# Altium schematic symbol library HSR_BM28B06.SchLib: 8 symbols
Pins are listed as number, name and electrical type; pins without a type are passive.

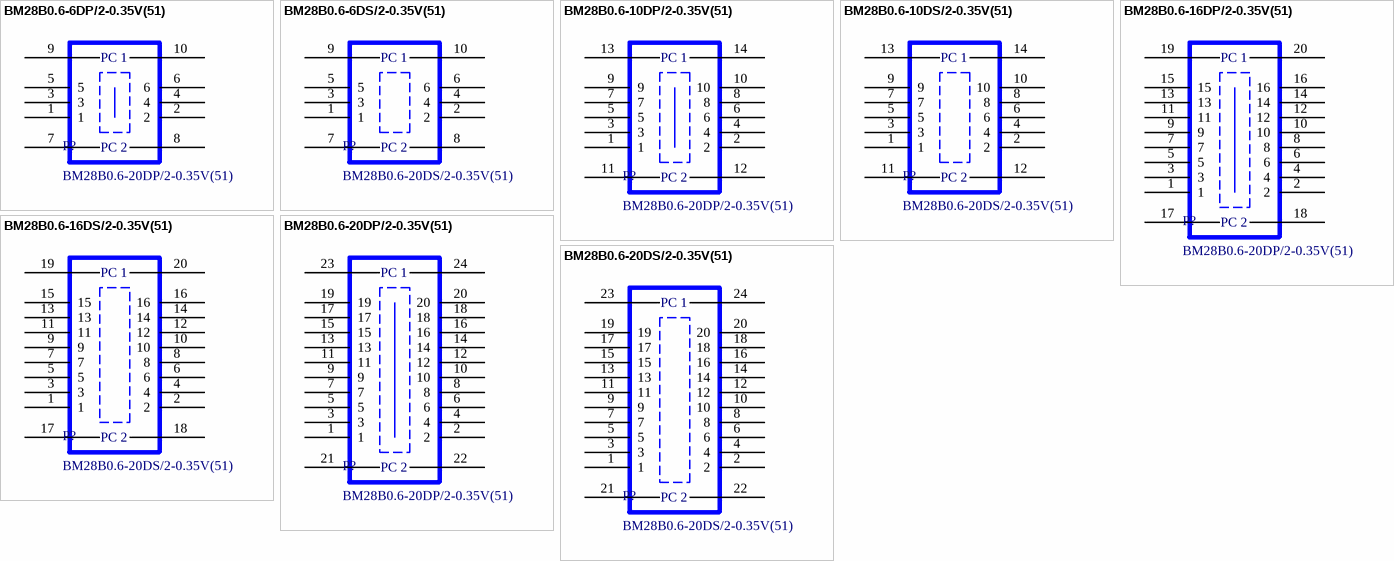
[diagram p0: symbols BM28B0.6-6DP/2-0.35V(51) to BM28B0.6-20DS/2-0.35V(51)]

## BM28B0.6-6DP/2-0.35V(51)
designator P?, comment BM28B0.6-20DP/2-0.35V(51)
Board to Board & Mezzanine Connectors 20P Receptacle Straight SMT; Manufacturer Part Number: BM28B0.6-6DP/2-0.35V(51); Manufacturer: HRS; Value: BM28B0.6-6DP/2-0.35V(51); Voltage Rating DC: 30 V; Current Rating: 5 A; Number of Positions: 8 Position; Pitch: 0.35 mm; Stack Height: 0.6 mm; ComponentLink1Description: Datasheet; ComponentLink1URL: https://www.lcsc.com/datasheet/C424566.pdf?spm=wm.sxq.inf.ggs___wm.fly.bg.3.xh&lcsc_vid=EgBcAV1UFlAKBQdXRlNcUAEEFFIIXl0ARllXUAFfEQQxVlNfQ1hXUlNXQFlcXjsOAxUeFF5JWBYZEEoKFBINSQcJGk4%3D; LCSC Part #: C3648001; Mount: SMD/SMT; Operating Temperature Max: + 85 C; Operating Temperature Min: - 40 C; Packaging: Tape and Reel; Supplier 1 Part Number: 798-28066DP2035V51; Supplier 1 URL: https://www.mouser.vn/en/ProductDetail/Hirose-Connector/BM28B0.6-6DP-2-0.35V51?qs=T3oQrply3y%2FM1wQ2gqV8bg%3D%3D; Supplier 1: Mouser; Supplier 2 Part Number: 26-BM28B0.6-6DP/2-0.35V(51)TR-ND; Supplier 2 URL: https://www.digikey.com/en/products/detail/hirose-electric-co-ltd/BM28B0-6-6DP-2-0-35V-51/11204850?s=N4IgTCBcDaIEIFkwA44AYB0A2AtFgIgAoD0YOmAzAKwBqAFFQIwCUIAugL5A; Supplier 2: Digi-Key; Supplier 3 Part Number: N/A; Supplier 3 URL: N/A; Supplier 3: thegioiic; Mounting Angle: Straight; Number of Rows: 2 Row; Product: Headers
footprint BM28B0.6-6DP/2-0.35V(51)
pins: 1, 2, 3, 4, 5, 6, 7, 8 22, 9, 10 P
text: PC 1; PC 2

## BM28B0.6-6DS/2-0.35V(51)
designator P?, comment BM28B0.6-20DS/2-0.35V(51)
Board to Board & Mezzanine Connectors 20P Receptacle Straight SMT; Manufacturer Part Number: BM28B0.6-6DS/2-0.35V(51); Manufacturer: HRS; Value: BM28B0.6-6DS/2-0.35V(51); Voltage Rating DC: 30 V; Current Rating: 5 A; Number of Positions: 8 Position; Pitch: 0.35 mm; Stack Height: 0.6 mm; ComponentLink1Description: Datasheet; ComponentLink1URL: https://www.lcsc.com/datasheet/C424567.pdf?spm=wm.sxq.inf.ggs___wm.fly.bg.2.xh&lcsc_vid=EgBcAV1UFlAKBQdXRlNcUAEEFFIIXl0ARllXUAFfEQQxVlNfQ1hXUlNXQFlcXjsOAxUeFF5JWBYZEEoKFBINSQcJGk4%3D; LCSC Part #: C3646686; Mount: SMD/SMT; Operating Temperature Max: + 85 C; Operating Temperature Min: - 40 C; Packaging: Tape and Reel; Supplier 1 Part Number: 798-28066DS2035V51; Supplier 1 URL: https://www.mouser.vn/en/ProductDetail/Hirose-Connector/BM28B0.6-6DS-2-0.35V51?qs=T3oQrply3y%252BZnBLLPh%2FqBg%3D%3D; Supplier 1: Mouser; Supplier 2 Part Number: 26-BM28B0.6-6DS/2-0.35V(51)TR-ND; Supplier 2 URL: https://www.digikey.com/en/products/detail/hirose-electric-co-ltd/bm28b0-6-6ds-2-0-35v-51/11204526; Supplier 2: Digi-Key; Supplier 3 Part Number: N/A; Supplier 3 URL: N/A; Supplier 3: thegioiic; Mounting Angle: Straight; Number of Rows: 2 Row; Product: Receptacles
footprint BM28B0.6-6DS/2-0.35V(51)
pins: 1, 2, 3, 4, 5, 6, 7, 8 22, 9, 10 P
text: PC 1; PC 2

## BM28B0.6-10DP/2-0.35V(51)
designator P?, comment BM28B0.6-20DP/2-0.35V(51)
Board to Board & Mezzanine Connectors 20P Receptacle Straight SMT; Manufacturer Part Number: BM28B0.6-10DP/2-0.35V(51); Manufacturer: HRS; Value: BM28B0.6-10DP/2-0.35V(51); Voltage Rating DC: 30 V; Current Rating: 5 A; Number of Positions: 10 Position; Pitch: 0.35 mm; Stack Height: 0.6 mm; ComponentLink1Description: Datasheet; ComponentLink1URL: https://www.lcsc.com/datasheet/C424566.pdf?spm=wm.sxq.inf.ggs___wm.fly.bg.3.xh&lcsc_vid=EgBcAV1UFlAKBQdXRlNcUAEEFFIIXl0ARllXUAFfEQQxVlNfQ1hXUlNXQFlcXjsOAxUeFF5JWBYZEEoKFBINSQcJGk4%3D; LCSC Part #: C424562; Mount: SMD/SMT; Operating Temperature Max: + 85 C; Operating Temperature Min: - 40 C; Packaging: Tape and Reel; Supplier 1 Part Number: 798-28B0610DP2035V51; Supplier 1 URL: https://www.mouser.vn/en/ProductDetail/Hirose-Connector/BM28B0.6-10DP-2-0.35V51?qs=1mbolxNpo8caOqb2VO21kA%3D%3D; Supplier 1: Mouser; Supplier 2 Part Number: 26-BM28B0.6-10DP/2-0.35V(51)TR-ND; Supplier 2 URL: https://www.digikey.com/en/products/detail/hirose-electric-co-ltd/bm28b0-6-10dp-2-0-35v-51/7789663; Supplier 2: Digi-Key; Supplier 3 Part Number: N/A; Supplier 3 URL: N/A; Supplier 3: thegioiic; Mounting Angle: Straight; Number of Rows: 2 Row; Product: Headers
footprint BM28B0.6-10DP/2-0.35V(51)
pins: 1, 2, 3, 4, 5, 6, 7, 8, 9, 10, 11, 12, 13 P, 14 P
text: PC 1; PC 2

## BM28B0.6-10DS/2-0.35V(51)
designator P?, comment BM28B0.6-20DS/2-0.35V(51)
Board to Board & Mezzanine Connectors 20P Receptacle Straight SMT; Manufacturer Part Number: BM28B0.6-10DS/2-0.35V(51); Manufacturer: HRS; Value: BM28B0.6-10DS/2-0.35V(51); Voltage Rating DC: 30 V; Current Rating: 5 A; Number of Positions: 10 Position; Pitch: 0.35 mm; Stack Height: 0.6 mm; ComponentLink1Description: Datasheet; ComponentLink1URL: https://www.lcsc.com/datasheet/C424567.pdf?spm=wm.sxq.inf.ggs___wm.fly.bg.2.xh&lcsc_vid=EgBcAV1UFlAKBQdXRlNcUAEEFFIIXl0ARllXUAFfEQQxVlNfQ1hXUlNXQFlcXjsOAxUeFF5JWBYZEEoKFBINSQcJGk4%3D; LCSC Part #: C424563; Mount: SMD/SMT; Operating Temperature Max: + 85 C; Operating Temperature Min: - 40 C; Packaging: Tape and Reel; Supplier 1 Part Number: 798-28B0610DS2035V51; Supplier 1 URL: https://www.mouser.vn/en/ProductDetail/Hirose-Connector/BM28B0.6-10DS-2-0.35V51?qs=1mbolxNpo8fN5g%252Bvr0Y4nA%3D%3D; Supplier 1: Mouser; Supplier 2 Part Number: 26-BM28B0.6-10DS/2-0.35V(51)TR-ND; Supplier 2 URL: https://www.digikey.com/en/products/detail/hirose-electric-co-ltd/bm28b0-6-10ds-2-0-35v-51/7789675; Supplier 2: Digi-Key; Supplier 3 Part Number: N/A; Supplier 3 URL: N/A; Supplier 3: thegioiic; Mounting Angle: Straight; Number of Rows: 2 Row; Product: Receptacles
footprint BM28B0.6-10DS/2-0.35V(51)
pins: 1, 2, 3, 4, 5, 6, 7, 8, 9, 10, 11, 12, 13 P, 14 P
text: PC 1; PC 2

## BM28B0.6-16DP/2-0.35V(51)
designator P?, comment BM28B0.6-20DP/2-0.35V(51)
Board to Board & Mezzanine Connectors 20P Receptacle Straight SMT; Manufacturer Part Number: BM28B0.6-16DP/2-0.35V(51); Manufacturer: HRS; Value: BM28B0.6-16DP/2-0.35V(51); Voltage Rating DC: 30 V; Current Rating: 5 A; Number of Positions: 18 Position; Pitch: 0.35 mm; Stack Height: 0.6 mm; ComponentLink1Description: Datasheet; ComponentLink1URL: https://www.lcsc.com/datasheet/C424566.pdf?spm=wm.sxq.inf.ggs___wm.fly.bg.3.xh&lcsc_vid=EgBcAV1UFlAKBQdXRlNcUAEEFFIIXl0ARllXUAFfEQQxVlNfQ1hXUlNXQFlcXjsOAxUeFF5JWBYZEEoKFBINSQcJGk4%3D; LCSC Part #: C424564; Mount: SMD/SMT; Operating Temperature Max: + 85 C; Operating Temperature Min: - 40 C; Packaging: Tape and Reel; Supplier 1 Part Number: 798-28B0616DP2035V51; Supplier 1 URL: https://www.mouser.vn/en/ProductDetail/Hirose-Connector/BM28B0.6-16DP-2-0.35V51?qs=1mbolxNpo8eK8eXwvLiIoA%3D%3D; Supplier 1: Mouser; Supplier 2 Part Number: 26-BM28B0.6-16DP/2-0.35V(51)TR-ND; Supplier 2 URL: https://www.digikey.com/en/products/detail/hirose-electric-co-ltd/bm28b0-6-16dp-2-0-35v-51/7789664; Supplier 2: Digi-Key; Supplier 3 Part Number: N/A; Supplier 3 URL: N/A; Supplier 3: thegioiic; Mounting Angle: Straight; Number of Rows: 2 Row; Product: Headers
footprint BM28B0.6-16DP/2-0.35V(51)
pins: 1, 2, 3, 4, 5, 6, 7, 8, 9, 10, 11, 12, 13, 14, 15, 16, 17, 18 22, 19 P, 20 P
text: PC 1; PC 2

## BM28B0.6-16DS/2-0.35V(51)
designator P?, comment BM28B0.6-20DS/2-0.35V(51)
Board to Board & Mezzanine Connectors 20P Receptacle Straight SMT; Manufacturer Part Number: BM28B0.6-16DS/2-0.35V(51); Manufacturer: HRS; Value: BM28B0.6-16DS/2-0.35V(51); Voltage Rating DC: 30 V; Current Rating: 5 A; Number of Positions: 18 Position; Pitch: 0.35 mm; Stack Height: 0.6 mm; ComponentLink1Description: Datasheet; ComponentLink1URL: https://www.lcsc.com/datasheet/C424567.pdf?spm=wm.sxq.inf.ggs___wm.fly.bg.2.xh&lcsc_vid=EgBcAV1UFlAKBQdXRlNcUAEEFFIIXl0ARllXUAFfEQQxVlNfQ1hXUlNXQFlcXjsOAxUeFF5JWBYZEEoKFBINSQcJGk4%3D; LCSC Part #: C424565; Mount: SMD/SMT; Operating Temperature Max: + 85 C; Operating Temperature Min: - 40 C; Packaging: Tape and Reel; Supplier 1 Part Number: 798-28B0616DS2035V51; Supplier 1 URL: https://www.mouser.vn/en/ProductDetail/Hirose-Connector/BM28B0.6-16DS-2-0.35V51?qs=1mbolxNpo8eGKxOIanEYhA%3D%3D; Supplier 1: Mouser; Supplier 2 Part Number: 26-BM28B0.6-16DS/2-0.35V(51)TR-ND; Supplier 2 URL: https://www.digikey.com/en/products/detail/hirose-electric-co-ltd/bm28b0-6-16ds-2-0-35v-51/7789676; Supplier 2: Digi-Key; Supplier 3 Part Number: N/A; Supplier 3 URL: N/A; Supplier 3: thegioiic; Mounting Angle: Straight; Number of Rows: 2 Row; Product: Receptacles
footprint BM28B0.6-16DS/2-0.35V(51)
pins: 1, 2, 3, 4, 5, 6, 7, 8, 9, 10, 11, 12, 13, 14, 15, 16, 17, 18 22, 19 P, 20 P
text: PC 1; PC 2

## BM28B0.6-20DP/2-0.35V(51)
designator P?
Board to Board & Mezzanine Connectors 20P Receptacle Straight SMT; Manufacturer: HRS; Voltage Rating DC: 30 V; Current Rating: 5 A; Number of Positions: 22 Position; Pitch: 0.35 mm; Stack Height: 0.6 mm; ComponentLink1Description: Datasheet; ComponentLink1URL: https://www.lcsc.com/datasheet/C424566.pdf?spm=wm.sxq.inf.ggs___wm.fly.bg.3.xh&lcsc_vid=EgBcAV1UFlAKBQdXRlNcUAEEFFIIXl0ARllXUAFfEQQxVlNfQ1hXUlNXQFlcXjsOAxUeFF5JWBYZEEoKFBINSQcJGk4%3D; LCSC Part #: C424566; Manufacturer Part Number: BM28B0.6-20DP/2-0.35V(51); Mount: SMD/SMT; Operating Temperature Max: + 85 C; Operating Temperature Min: - 40 C; Packaging: Tape and Reel; Supplier 1 Part Number: 798-28B0620DP2035V51; Supplier 1 URL: https://www.mouser.vn/en/ProductDetail/Hirose-Connector/BM28B0.6-20DP-2-0.35V51?qs=1mbolxNpo8fEjrN%252BWzgcxQ%3D%3D; Supplier 1: Mouser; Supplier 2 Part Number: 26-BM28B0.6-20DP/2-0.35V(51)TR-ND; Supplier 2 URL: https://www.digikey.com/en/products/detail/hirose-electric-co-ltd/bm28b0-6-20dp-2-0-35v-51/7789665; Supplier 2: Digi-Key; Supplier 3 Part Number: N/A; Supplier 3 URL: N/A; Supplier 3: thegioiic; Value: BM28B0.6-20DP/2-0.35V(51); Mounting Angle: Straight; Number of Rows: 2 Row; Product: Headers
footprint BM28B0.6-20DP/2-0.35V(51)
pins: 1, 2, 3, 4, 5, 6, 7, 8, 9, 10, 11, 12, 13, 14, 15, 16, 17, 18, 19, 20, 21, 22, 23 P, 24 P
text: PC 1; PC 2

## BM28B0.6-20DS/2-0.35V(51)
designator P?
Board to Board & Mezzanine Connectors 20P Receptacle Straight SMT; Manufacturer: HRS; Voltage Rating DC: 30 V; Current Rating: 5 A; Number of Positions: 22 Position; Pitch: 0.35 mm; Stack Height: 0.6 mm; ComponentLink1Description: Datasheet; ComponentLink1URL: https://www.lcsc.com/datasheet/C424567.pdf?spm=wm.sxq.inf.ggs___wm.fly.bg.2.xh&lcsc_vid=EgBcAV1UFlAKBQdXRlNcUAEEFFIIXl0ARllXUAFfEQQxVlNfQ1hXUlNXQFlcXjsOAxUeFF5JWBYZEEoKFBINSQcJGk4%3D; LCSC Part #: C424567; Manufacturer Part Number: BM28B0.6-20DS/2-0.35V(51); Mount: SMD/SMT; Operating Temperature Max: + 85 C; Operating Temperature Min: - 40 C; Packaging: Tape and Reel; Supplier 1 Part Number: 798-28B0620DS2035V51; Supplier 1 URL: https://www.mouser.vn/en/ProductDetail/Hirose-Connector/BM28B0.6-20DS-2-0.35V51?qs=1mbolxNpo8fAKOmOewZJ2g%3D%3D; Supplier 1: Mouser; Supplier 2 Part Number: 26-BM28B0.6-20DS/2-0.35V(51)TR-ND; Supplier 2 URL: https://www.digikey.com/en/products/detail/hirose-electric-co-ltd/bm28b0-6-20ds-2-0-35v-51/7789677; Supplier 2: Digi-Key; Supplier 3 Part Number: N/A; Supplier 3 URL: N/A; Supplier 3: thegioiic; Value: BM28B0.6-20DS/2-0.35V(51); Mounting Angle: Straight; Number of Rows: 2 Row; Product: Receptacles
footprint BM28B0.6-20DS/2-0.35V(51)
pins: 1, 2, 3, 4, 5, 6, 7, 8, 9, 10, 11, 12, 13, 14, 15, 16, 17, 18, 19, 20, 21, 22, 23 P, 24 P
text: PC 1; PC 2